# Altium schematic symbol library NFC_Luggage_Tag.SCHLIB: 19 symbols
Pins are listed as number, name and electrical type; pins without a type are passive.

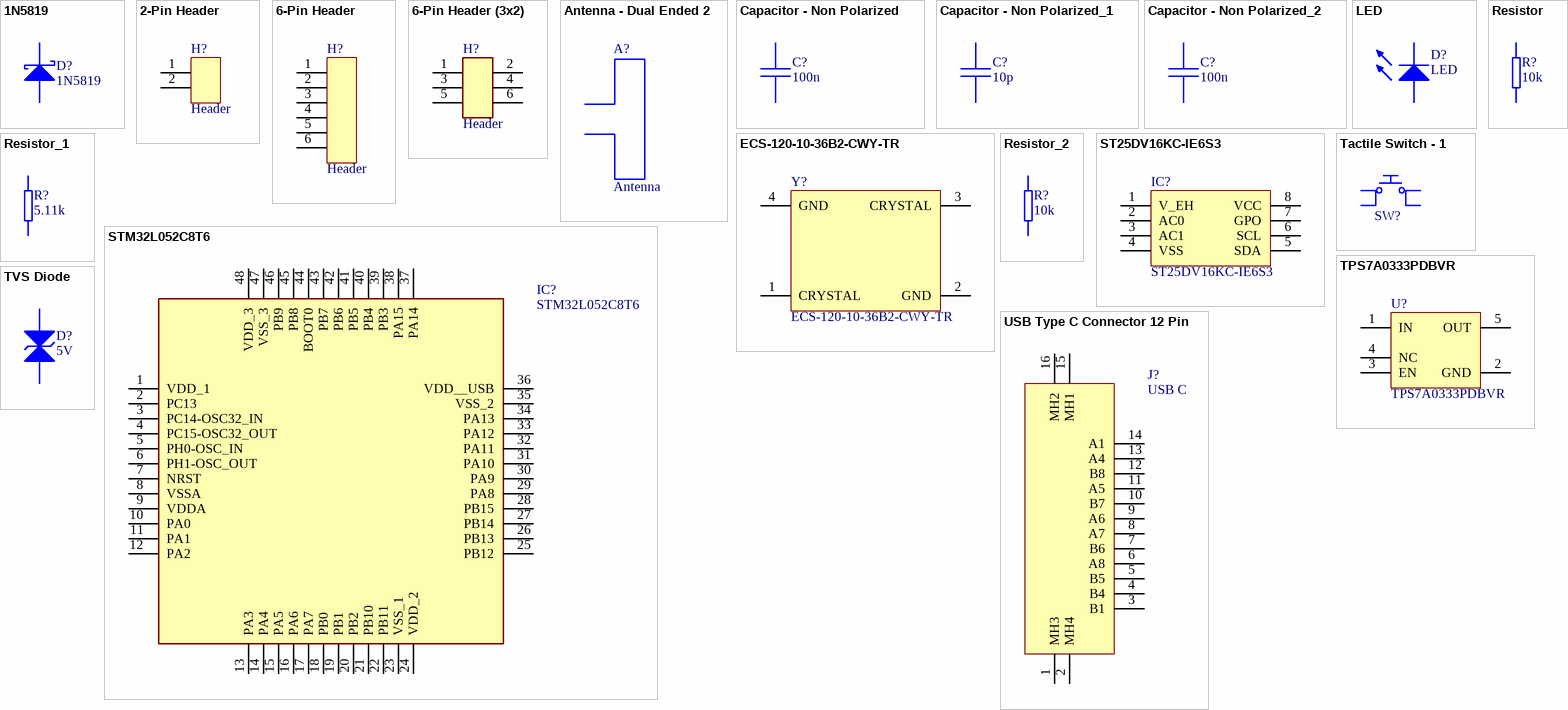
[diagram p0: symbols 1N5819 to USB Type C Connector 12 Pin]

## 1N5819
designator D?
1N5819 Schottkey Diode
footprint SOD323
pins: 1 K, 2 A

## 2-Pin Header
designator H?, comment Header
2-Pin Header
footprint Header_1X2
pins: 1, 2

## 6-Pin Header
designator H?, comment Header
6-Pin Header
footprint Header_1X6
pins: 1, 2, 3, 4, 5, 6

## 6-Pin Header (3x2)
designator H?, comment Header
6-Pin 2 Row Header
footprint HEADER_2X3
pins: 1, 2, 3, 4, 5, 6

## Antenna - Dual Ended 2
designator A?, comment Antenna  (net tie, no BOM)
Antenna - Dual Ended
footprint NFC Antenna 45 x 37 (18mm x 18mm)
pins: 1, 2

## Capacitor - Non Polarized
designator C?, comment 100n
Non Polarized Capacitor
footprint CAP0805 (Chip Capacitor, 2-Leads, Body 2.00x1.20mm, IPC Medium Density)
pins: 1, 2

## Capacitor - Non Polarized_1
designator C?, comment 10p
Non Polarized Capacitor
footprint CAP0402
pins: 1, 2

## Capacitor - Non Polarized_2
designator C?, comment 100n
Non Polarized Capacitor
footprint CAP0805 (Chip Capacitor, 2-Leads, Body 2.00x1.20mm, IPC Medium Density)
pins: 1, 2

## ECS-120-10-36B2-CWY-TR
designator Y?
Crystal or Oscillator; Manufacturer_Name: ECS; Datasheet Link: https://ecsxtal.com/store/pdf/ECX-2236B2.pdf; Height: 0.6mm; Manufacturer_Part_Number: ECS-120-10-36B2-CWY-TR; Mouser Part Number: 520-120-10-36B2CWYTR; Mouser Price/Stock: https://www.mouser.co.uk/ProductDetail/ECS/ECS-120-10-36B2-CWY-TR?qs=QNEnbhJQKva%2FwIO%2FvYs2yg%3D%3D; Arrow Part Number: ECS-120-10-36B2-CWY-TR; Arrow Price/Stock: https://www.arrow.com/en/products/ecs-120-10-36b2-cwy-tr/ecs-international.html?utm_currency=USD&region=europe
footprint ECS1201036B2CWYTR
pins: 1 CRYSTAL, 2 GND, 3 CRYSTAL, 4 GND

## LED
designator D?
General Purpose LED; ComponentLink1Description: Datasheet; ComponentLink1URL: https://www.smc-diodes.com/propdf/1N4148W%20N0571%20REV.E.pdf
footprint SMDLED2012X06N (Chip LED, 2-Leads, Body 2.00x1.20mm)
footprint LEDM2012X80N
pins: 1 K, 2 A

## Resistor
designator R?, comment 10k
Resistor
footprint RESC0805 (Chip Resistor, 2-Leads, Body 2.00x1.20mm, IPC Medium Density)
pins: 1, 2

## Resistor_1
designator R?, comment 5.11k
Resistor
footprint RESC0805 (Chip Resistor, 2-Leads, Body 2.00x1.20mm, IPC Medium Density)
pins: 1, 2

## Resistor_2
designator R?, comment 10k
Resistor
footprint RESC0805 (Chip Resistor, 2-Leads, Body 2.00x1.20mm, IPC Medium Density)
pins: 1, 2

## ST25DV16KC-IE6S3
designator IC?
Integrated Circuit; Manufacturer_Name: STMicroelectronics; Datasheet Link: https://www.st.com/resource/en/datasheet/st25dv04kc.pdf; Height: 1.75mm; Manufacturer_Part_Number: ST25DV16KC-IE6S3; Mouser Part Number: 511-ST25DV16KC-IE6S3; Mouser Price/Stock: https://www.mouser.co.uk/ProductDetail/STMicroelectronics/ST25DV16KC-IE6S3?qs=QNEnbhJQKvbFHl9iSDOFGA%3D%3D; Arrow Part Number: ST25DV16KC-IE6S3; Arrow Price/Stock: https://www.arrow.com/en/products/st25dv16kc-ie6s3/stmicroelectronics?region=nac
footprint SOIC8
pins: 1 V_EH, 2 AC0, 3 AC1, 4 VSS, 5 SDA, 6 SCL, 7 GPO, 8 VCC

## STM32L052C8T6
designator IC?
Integrated Circuit; Manufacturer_Name: STMicroelectronics; Datasheet Link: http://www.st.com/content/ccc/resource/technical/document/datasheet/dc/d6/6d/24/86/2a/40/d3/DM00108217.pdf/files/DM00108217.pdf/jcr:content/translations/en.DM00108217.pdf; Height: 1.6mm; Manufacturer_Part_Number: STM32L052C8T6; Mouser Part Number: 511-STM32L052C8T6; Mouser Price/Stock: https://www.mouser.co.uk/ProductDetail/STMicroelectronics/STM32L052C8T6?qs=DqCdCwOw4%2F6IOKsu3MZAIw%3D%3D; Arrow Part Number: STM32L052C8T6; Arrow Price/Stock: https://www.arrow.com/en/products/stm32l052c8t6/stmicroelectronics?utm_currency=USD&region=nac
footprint QFP50P900X900X160-48N
pins: 1 VDD_1, 2 PC13, 3 PC14-OSC32_IN, 4 PC15-OSC32_OUT, 5 PH0-OSC_IN, 6 PH1-OSC_OUT, 7 NRST, 8 VSSA, 9 VDDA, 10 PA0, 11 PA1, 12 PA2, 13 PA3, 14 PA4, 15 PA5, 16 PA6, 17 PA7, 18 PB0, 19 PB1, 20 PB2, 21 PB10, 22 PB11, 23 VSS_1, 24 VDD_2, 25 PB12, 26 PB13, 27 PB14, 28 PB15, 29 PA8, 30 PA9, 31 PA10, 32 PA11, 33 PA12, 34 PA13, 35 VSS_2, 36 VDD__USB, 37 PA14, 38 PA15, 39 PB3, 40 PB4, 41 PB5, 42 PB6, 43 PB7, 44 BOOT0, 45 PB8, 46 PB9, 47 VSS_3, 48 VDD_3

## Tactile Switch - 1
designator SW?  (value not drawn)
Tactile Pushbutton - Contact Pad
footprint Tactile Button 4.2mm x 3.2mm
pins: 1, 2, 3, 4

## TPS7A0333PDBVR
designator U?
TPS7A03 Nanopower IQ, 200-nA, 200-mA, Low-Dropout Voltage Regulator With Fast / Transient Response; Manufacturer_Name: Texas Instruments; Datasheet Link: https://www.ti.com/lit/ds/symlink/tps7a03.pdf?HQS=dis-dk-null-digikeymode-dsf-pf-null-wwe&ts=1622188030827&ref_url=https%253A%252F%252Fwww.digikey.in%252F; Height: 1.45mm; Manufacturer_Part_Number: TPS7A0333PDBVR; Mouser Part Number: 595-TPS7A0333PDBVR; Mouser Price/Stock: https://www.mouser.co.uk/ProductDetail/Texas-Instruments/TPS7A0333PDBVR?qs=OlC7AqGiEDkyaMBNBZB82A%3D%3D; Arrow Part Number: TPS7A0333PDBVR; Arrow Price/Stock: https://www.arrow.com/en/products/tps7a0333pdbvr/texas-instruments?region=nac
footprint SOT23-5
pins: 1 IN, 2 GND, 3 EN, 4 NC, 5 OUT

## TVS Diode
designator D?, comment 5V
TVS Diode
footprint SOD323
pins: 1 A, 2 K

## USB Type C Connector 12 Pin
designator J?, comment USB C
footprint USB TYPE C 12 PIN
pins: 1 MH3, 2 MH4, 3 B1, 4 B4, 5 B5, 6 A8, 7 B6, 8 A7, 9 A6, 10 B7, 11 A5, 12 B8, 13 A4, 14 A1, 15 MH1, 16 MH2